# Altium schematic symbol library Trimmer_Common.SchLib: 1 symbol
Pins are listed as number, name and electrical type; pins without a type are passive.

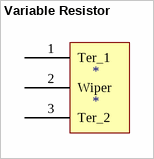
[diagram p0: symbol Variable Resistor]

## Variable Resistor
designator *
footprint PCBComponent_1
pins: 1 Ter_1, 2 Wiper, 3 Ter_2